# Altium schematic symbol library StabilizatorNapiecia.SchLib: 1 symbol
Pins are listed as number, name and electrical type; pins without a type are passive.

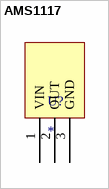
[diagram p0: symbol AMS1117]

## AMS1117
designator U?
footprint AMS1117
pins: 1 VIN, 2 OUT, 3 GND